# Altium footprint library AltiumTaskLib.PcbLib: 11 footprints
Each footprint in its own frame and in the unit in brackets; x right, y up, seen from the top. Pads: shape width x height; smd on the part's side, far side on the other; paste and mask are expansions set on the pad; w line width, h text height; cw(c..) or ccw(c..) is an arc to the next point about the centre after c.
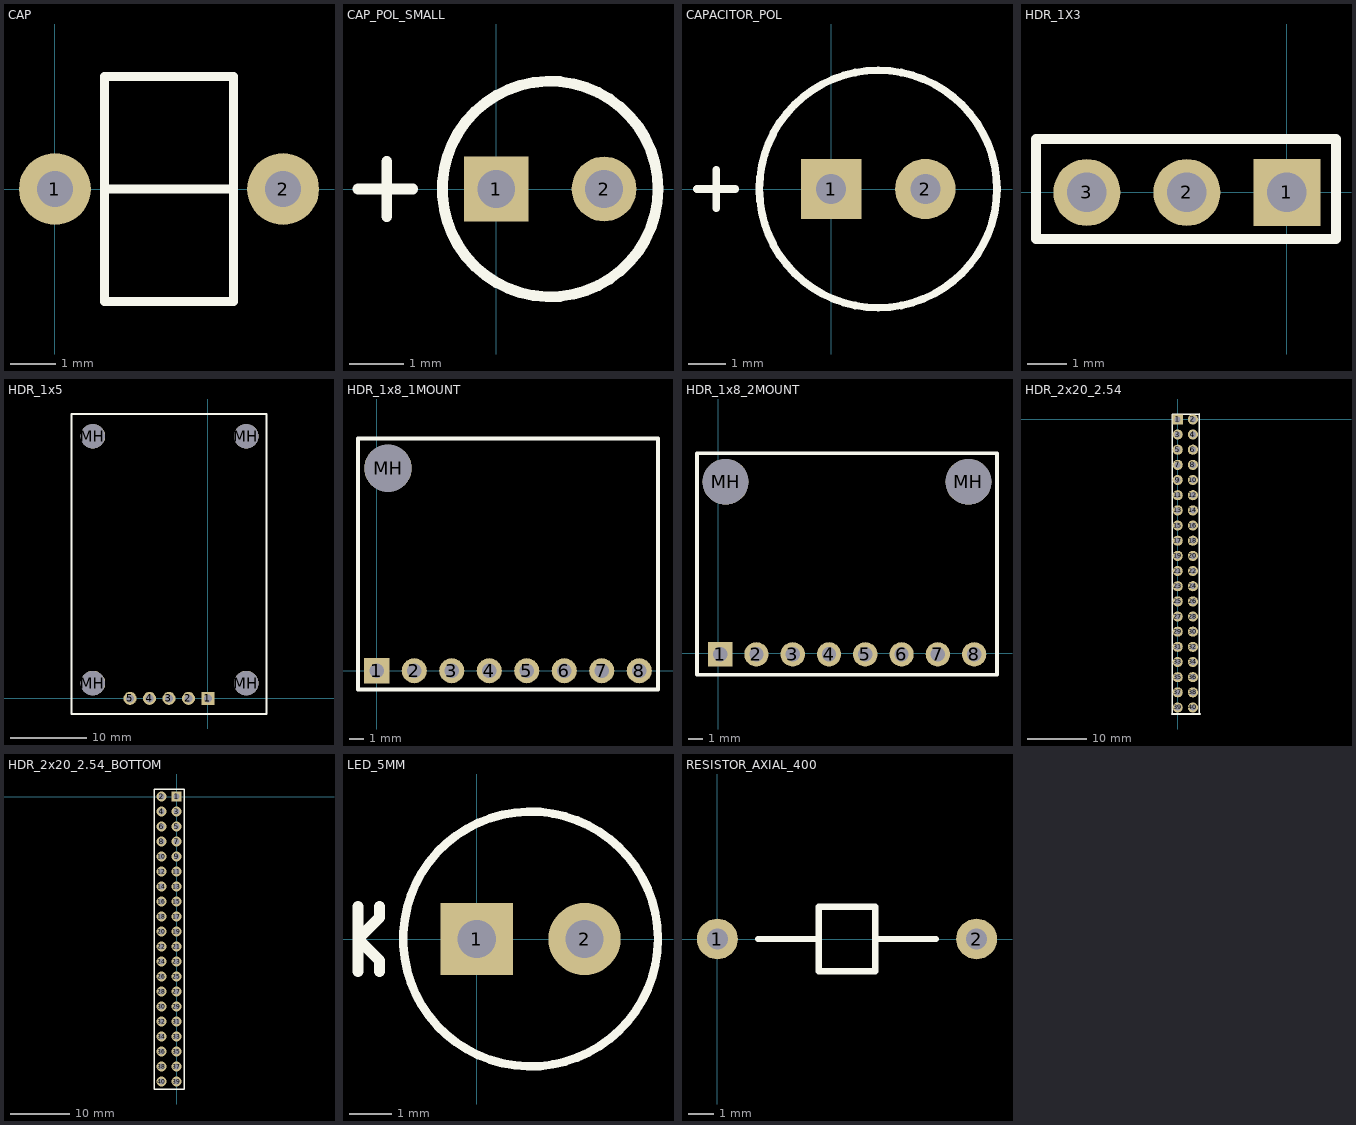
[diagram p0: the footprints below, top view; thin cyan lines are the x and y axes]

## CAP [mm]
pads (2):
  round 1.6 hole 0.8: 1(0,0) 2(5.08,0)
Top Overlay:
  lines w0.2: 1.105,0 3.48,0 ; 1.6,0 3.975,0 ; 3.975,0 3.975,2.5 1.105,2.5 1.105,-2.5 3.975,-2.5 3.975,0

## CAP_POL_SMALL [mm]
pads (2):
  rect 1.2x1.2 hole 0.7: 1(0,0)
  round 1.2 hole 0.7: 2(2,0)
Top Overlay:
  circle w0.2: c1,0 r2
  lines w0.2: -2.564,0 -1.548,0 ; -2.032,-0.508 -2.032,0.508

## CAPACITOR_POL [mm]
pads (2):
  rect 1.6x1.6 hole 0.8: 1(0,0)
  round 1.6 hole 0.8: 2(2.5,0)
Top Overlay:
  circle w0.2: c1.25,0 r3.15
  lines w0.2: -3.556,0 -2.54,0 ; -3.048,-0.508 -3.048,0.508

## HDR_1X3 [mm]
pads (3):
  rect 1.7x1.7 hole 1: 1(0,0)
  round 1.7 hole 1: 2(-2.54,0) 3(-5.08,0)
Top Overlay:
  lines w0.254: -6.371,-1.183 1.249,-1.183 1.249,1.357 -6.371,1.357 -6.371,-1.183
3D body: height 8.5, standoff 0, extent -6.371,-1.183 1.249,1.357

## HDR_1x5 [mm] "GNSS module"
pads (9):
  rect 1.7x1.7 hole 1: 1(0,0)
  round 1.7 hole 1: 2(-2.54,0) 3(-5.08,0) 4(-7.62,0) 5(-10.16,0)
  round 3.2 hole 3.2 unplated: MH(-15,2) MH(-15,34.2) MH(5,2) MH(5,34.2)
Top Overlay:
  lines w0.254: -17.78,-2.032 -17.78,37.084 7.62,37.084 7.62,-2.032 -17.78,-2.032
3D body: height 0.25, standoff 0, extent -17.78,-2.032 7.62,37.084
3D body: height 8.5, standoff 0, extent -11.684,-1.524 1.524,1.524

## HDR_1x8_1MOUNT [mm] "HW-290"
pads (9):
  rect 1.7x1.7 hole 1: 1(0,0)
  round 1.7 hole 1: 2(2.54,0) 3(5.08,0) 4(7.62,0) 5(10.16,0) 6(12.7,0) 7(15.24,0) 8(17.78,0)
  round 3.2 hole 3.2 unplated: MH(0.762,13.716)
Top Overlay:
  lines w0.254: -1.27,-1.27 -1.27,15.73 19.05,15.73 19.05,-1.27 -1.27,-1.27
3D body: height 8.5, standoff 0, extent -1.27,-1.27 19.05,1.27
3D body: height 2, standoff 0, extent -1.27,-1.27 19.05,15.748

## HDR_1x8_2MOUNT [mm] "ADXL345"
pads (10):
  rect 1.7x1.7 hole 1: 1(0.12,-0.077)
  round 1.7 hole 1: 2(2.66,-0.077) 3(5.2,-0.077) 4(7.74,-0.077) 5(10.28,-0.077) 6(12.82,-0.077) 7(15.36,-0.077) 8(17.9,-0.077)
  round 3.2 hole 3.2 unplated: MH(0.5,12) MH(17.5,12)
Top Overlay:
  lines w0.254: -1.5,-1.5 19.5,-1.5 19.5,14 -1.5,14 -1.5,-1.5
3D body: height 8.5, standoff 0, extent -1,-1 19,1
3D body: height 1.5, standoff 0, extent -1.5,-1.5 19.5,14

## HDR_2x20_2.54 [mm] "Raspberry Pi 5"
pads (40):
  rect 1.7x1.7 hole 1: 1(0,0)
  round 1.7 hole 1: 2(2.54,0) 3(0,-2.54) 4(2.54,-2.54) 5(0,-5.08) 6(2.54,-5.08) 7(0,-7.62) 8(2.54,-7.62) 9(0,-10.16) 10(2.54,-10.16) 11(0,-12.7) 12(2.54,-12.7) 13(0,-15.24) 14(2.54,-15.24) 15(0,-17.78) 16(2.54,-17.78) 17(0,-20.32) 18(2.54,-20.32) 19(0,-22.86) 20(2.54,-22.86) 21(0,-25.4) 22(2.54,-25.4) 23(0,-27.94) 24(2.54,-27.94) 25(0,-30.48) 26(2.54,-30.48) 27(0,-33.02) 28(2.54,-33.02) 29(0,-35.56) 30(2.54,-35.56) 31(0,-38.1) 32(2.54,-38.1) 33(0,-40.64) 34(2.54,-40.64) 35(0,-43.18) 36(2.54,-43.18) 37(0,-45.72) 38(2.54,-45.72) 39(0,-48.26) 40(2.54,-48.26)
Top Overlay:
  lines w0.254: -0.375,-49.35 -0.775,-49.35 3.425,-49.35 ; 3.425,-49.35 3.75,-49.35 3.625,-49.225 3.625,0.9 3.575,0.85 -0.925,0.85 -0.925,-49.05 -0.925,-49.3 -0.975,-49.35 3.425,-49.35
3D body: height 8.5, standoff 0, extent -0.975,-49.325 3.675,0.925

## HDR_2x20_2.54_BOTTOM [mm] "Raspberry Pi 5"
pads (40):
  rect 1.7x1.7 hole 1: 1(0,0)
  round 1.7 hole 1: 2(-2.54,0) 3(0,-2.54) 4(-2.54,-2.54) 5(0,-5.08) 6(-2.54,-5.08) 7(0,-7.62) 8(-2.54,-7.62) 9(0,-10.16) 10(-2.54,-10.16) 11(0,-12.7) 12(-2.54,-12.7) 13(0,-15.24) 14(-2.54,-15.24) 15(0,-17.78) 16(-2.54,-17.78) 17(0,-20.32) 18(-2.54,-20.32) 19(0,-22.86) 20(-2.54,-22.86) 21(0,-25.4) 22(-2.54,-25.4) 23(0,-27.94) 24(-2.54,-27.94) 25(0,-30.48) 26(-2.54,-30.48) 27(0,-33.02) 28(-2.54,-33.02) 29(0,-35.56) 30(-2.54,-35.56) 31(0,-38.1) 32(-2.54,-38.1) 33(0,-40.64) 34(-2.54,-40.64) 35(0,-43.18) 36(-2.54,-43.18) 37(0,-45.72) 38(-2.54,-45.72) 39(0,-48.26) 40(-2.54,-48.26)
Top Overlay:
  lines w0.254: -3.81,-49.53 -3.81,1.27 1.27,1.27 1.27,-49.53 -3.81,-49.53
3D body: height 8.5, standoff 0, extent -3.81,-49.53 1.27,1.27

## LED_5MM [mm]
pads (2):
  rect 1.7x1.7 hole 0.9: 1(0,0)
  round 1.7 hole 0.9: 2(2.54,0)
Top Overlay:
  circle w0.2: c1.27,0 r3
  lines w0.254: -2.794,0.762 -2.794,-0.762 -2.794,0 ; -2.286,-0.762 -2.286,-0.508 -2.794,0 ; -2.286,0.762 -2.286,0.508 -2.794,0

## RESISTOR_AXIAL_400 [mil]
pads (2):
  round 63 hole 32: 1(0,0) 2(400,0)
Top Overlay:
  lines w10: 63,0 156.5,0 ; 243.5,0 337,0 ; 156.5,0 156.5,50 243.5,50 243.5,-50 156.5,-50 156.5,0